# Altium schematic symbol library TLP383GR-TPL,E.SchLib: 1 symbol
Pins are listed as number, name and electrical type; pins without a type are passive.

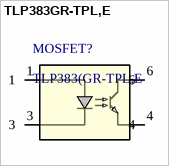
[diagram p0: symbol TLP383GR-TPL,E]

## TLP383GR-TPL,E
designator MOSFET?, comment TLP383(GR-TPL,E
Photocoupler (phototransistor output), DC input, 5000 Vrms, 4pin SO6L; Manufacturer_Name: Toshiba Electronic Devices & Storage Corp.; Number_devices_in_Package: 1; Copyright: Copyright (C) 2026 Ultra Librarian. All rights reserved.; Manufacturer_Part_Number: TLP383(GR-TPL,E; Datasheet: https://toshiba.semicon-storage.com/info/docget.jsp?did=28830&prodName=TLP383; Source_Package: TLP383; RefDes: Refdes; Type: Type
footprint 4pin SO6L_TOS
pins: 1, 3, 4, 6